# Altium footprint library LED-Optocupler$.PcbLib: 72 footprints (part 1 of 5)
Each footprint in its own frame and in the unit in brackets; x right, y up, seen from the top. Pads: shape width x height; smd on the part's side, far side on the other; paste and mask are expansions set on the pad; w line width, h text height; cw(c..) or ccw(c..) is an arc to the next point about the centre after c.
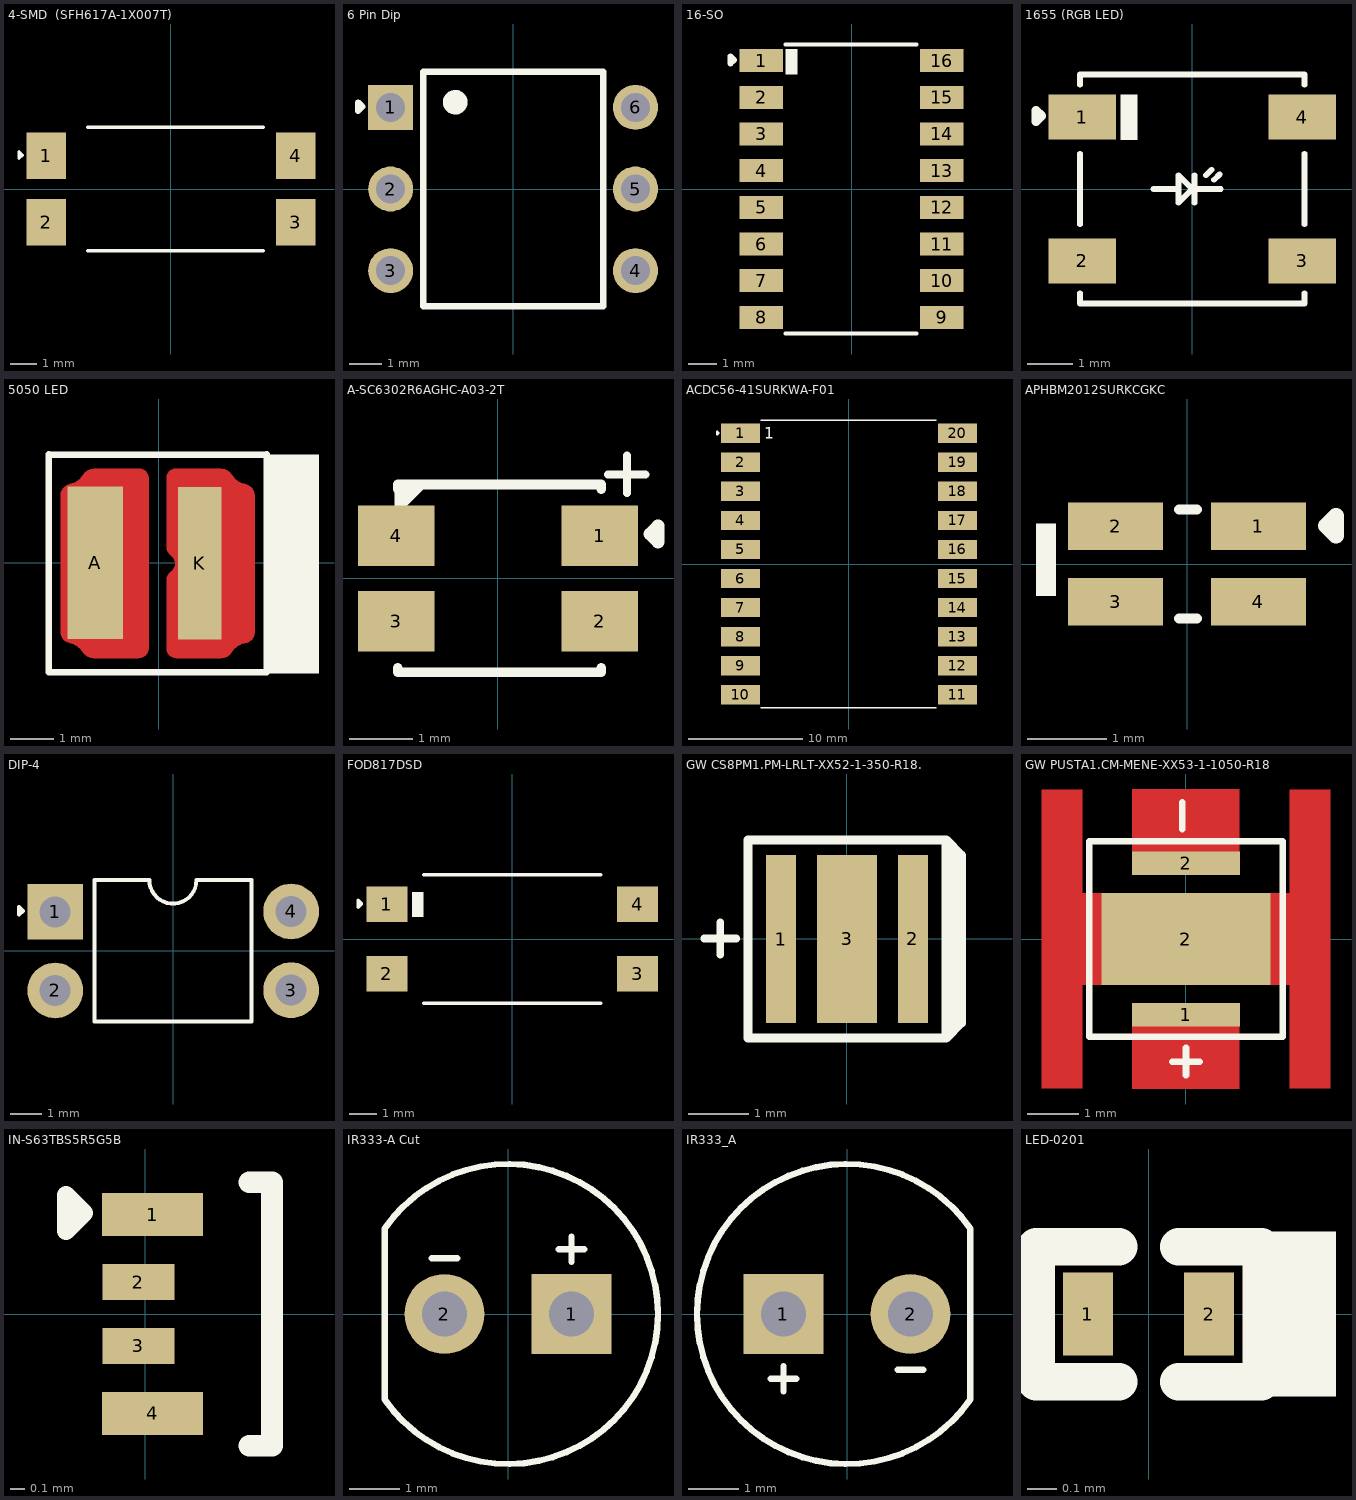
[diagram p0: the footprints below, top view; thin cyan lines are the x and y axes]

## 4-SMD  (SFH617A-1X007T) [mm]
pads (4):
  rect 1.52x1.78 smd mask+0.07: 1(-4.765,1.27) 2(-4.765,-1.27) 3(4.765,-1.27) 4(4.765,1.27)
Top Overlay:
  lines w0.127: -3.175,-2.362 3.531,-2.362 ; -3.175,2.362 3.531,2.362 ; -5.806,1.168 -5.806,1.422 -5.679,1.295 -5.806,1.168
3D body "DIP4-OP7.STEP": height 3.75, standoff 0.06, extent -5.08,-2.29 5.08,2.29

## 6 Pin Dip [mm]
pads (6):
  rect 1.4x1.4 hole 0.9: 1(-3.81,2.54)
  round 1.4 hole 0.9: 2(-3.81,0) 3(-3.81,-2.54) 4(3.81,-2.54) 5(3.81,0) 6(3.81,2.54)
Top Overlay:
  circle w0.2: c-1.8,2.7 r0.283
  lines w0.2: -1.8,2.7 -2,2.6 ; -2,2.6 -1.8,2.9 -1.6,2.7 -1.7,2.5 -2,2.6 ; -4.826,2.438 -4.826,2.692 -4.699,2.565 -4.826,2.438 ; -2.8,-3.65 2.8,-3.65 2.8,3.65 -2.8,3.65 -2.8,-3.65
3D body "User Library-DIP6-White.STEP": height 4.8, standoff -2.5, extent -4.06,-3.56 3.81,3.56

## 16-SO [mm]
pads (16):
  rect 1.5x0.8 smd: 1(-3.125,4.445) 2(-3.125,3.175) 3(-3.125,1.905) 4(-3.125,0.635) 5(-3.125,-0.635) 6(-3.125,-1.905) 7(-3.125,-3.175) 8(-3.125,-4.445) 9(3.125,-4.445) 10(3.125,-3.175) 11(3.125,-1.905) 12(3.125,-0.635) 13(3.125,0.635) 14(3.125,1.905) 15(3.125,3.175) 16(3.125,4.445)
Top Overlay:
  rectangle: -2.286,3.962 -1.88,4.851
  lines w0.127: -2.286,-5.004 2.261,-5.004 ; -2.286,5.004 2.261,5.004
  lines w0.2: -4.191,4.343 -4.191,4.597 -4.064,4.47 -4.191,4.343
3D body "User Library-SOIC-16-1.step": height 1.4, standoff 0, extent -3,-4.95 3,4.95

## 1655 (RGB LED) [mm]
pads (4):
  rect 1.5x1 smd: 1(-2.45,1.6) 2(-2.45,-1.6) 3(2.45,-1.6) 4(2.45,1.6)
Top Overlay:
  rectangle: -1.6,1.092 -1.219,2.108
  lines w0.127: -2.5,-2.322 -2.5,-2.551 2.5,-2.551 2.5,-2.322 ; -2.5,-0.786 -2.5,0.787 ; -2.5,2.322 -2.5,2.551 2.5,2.551 2.5,2.322 ; -0.864,0 -0.305,0 ; 0.051,-0.305 0.051,0.305 ; 0.051,0 0.635,0 ; 0.305,0.305 0.432,0.432 ; 0.483,0.203 0.61,0.33 ; 2.5,-0.786 2.5,0.787 ; -0.305,-0.305 0,0 -0.305,0.305 -0.305,-0.305
  lines w0.2: -3.48,1.499 -3.48,1.753 -3.353,1.626 -3.48,1.499
3D body "1655--3DModel-STEP-56544.STEP": height 1.58, standoff -0.02, extent -2.7,-2.5 2.7,2.5

## 5050 LED [mm]
pads (2):
  rect 1.27x3.5 smd: A(-1.451,0.005)
  rect 1x3.5 smd: K(0.943,-0.005)
Top Layer:
  region: -1.487,-2.185 -0.457,-2.185 -0.397,-2.177 -0.342,-2.154 -0.294,-2.117 -0.257,-2.07 -0.234,-2.014 -0.226,-1.955 -0.226,1.945 -0.235,2.003 -0.259,2.057 -0.296,2.103 -0.343,2.137 -0.398,2.159 -0.457,2.165 -1.487,2.165 -1.558,2.155 -1.625,2.128 -1.683,2.083 -1.727,2.025 -1.781,1.951 -1.781,1.95 -1.782,1.949 -1.783,1.948 -1.784,1.948 -1.852,1.888 -1.852,1.887 -1.853,1.887 -1.854,1.886 -1.855,1.886 -1.934,1.842 -1.936,1.841 -1.937,1.841 -1.938,1.841 -2.027,1.815 -2.086,1.796 -2.141,1.764 -2.186,1.72 -2.219,1.667 -2.24,1.608 -2.247,1.545 -2.247,-1.565 -2.241,-1.629 -2.221,-1.69 -2.187,-1.745 -2.142,-1.79 -2.087,-1.824 -2.027,-1.845 -1.938,-1.87 -1.937,-1.87 -1.936,-1.871 -1.934,-1.871 -1.934,-1.872 -1.855,-1.915 -1.854,-1.915 -1.853,-1.916 -1.852,-1.917 -1.852,-1.918 -1.784,-1.977 -1.783,-1.977 -1.782,-1.979 -1.781,-1.98 -1.727,-2.055 -1.682,-2.11 -1.624,-2.152 -1.557,-2.178
  region: 0.403,-2.185 1.444,-2.185 1.512,-2.177 1.576,-2.151 1.631,-2.109 1.673,-2.055 1.728,-1.98 1.729,-1.979 1.73,-1.977 1.731,-1.977 1.799,-1.918 1.799,-1.917 1.8,-1.916 1.801,-1.915 1.802,-1.915 1.881,-1.872 1.882,-1.871 1.883,-1.871 1.884,-1.87 1.885,-1.87 1.972,-1.845 1.973,-1.845 1.975,-1.844 2.033,-1.83 2.087,-1.802 2.134,-1.762 2.17,-1.712 2.194,-1.655 2.204,-1.595 2.204,1.545 2.196,1.609 2.173,1.669 2.138,1.722 2.091,1.766 2.035,1.797 1.975,1.815 1.974,1.815 1.972,1.816 1.887,1.842 1.887,1.841 1.885,1.842 1.884,1.843 1.807,1.887 1.806,1.887 1.805,1.888 1.804,1.888 1.804,1.889 1.738,1.948 1.738,1.949 1.737,1.95 1.736,1.951 1.684,2.025 1.64,2.083 1.582,2.128 1.515,2.155 1.444,2.165 0.403,2.165 0.347,2.158 0.293,2.136 0.248,2.101 0.213,2.055 0.191,2.002 0.184,1.945 0.184,0.365 0.19,0.31 0.21,0.258 0.241,0.212 0.282,0.177 0.284,0.175 0.285,0.174 0.33,0.134 0.331,0.133 0.332,0.132 0.332,0.131 0.364,0.08 0.365,0.08 0.365,0.078 0.366,0.077 0.382,0.019 0.383,0.019 0.383,0.017 0.383,0.016 0.383,0.015 0.383,-0.045 0.383,-0.047 0.383,-0.048 0.382,-0.049 0.366,-0.106 0.366,-0.107 0.365,-0.108 0.365,-0.109 0.364,-0.11 0.332,-0.161 0.331,-0.162 0.33,-0.163 0.33,-0.164 0.285,-0.203 0.284,-0.205 0.282,-0.206 0.242,-0.239 0.211,-0.282 0.191,-0.332 0.184,-0.385 0.184,-1.965 0.191,-2.022 0.213,-2.075 0.248,-2.12 0.293,-2.155 0.347,-2.177
Top Overlay:
  rectangle: 2.483,-2.54 3.683,2.494
  lines w0.15: -2.517,2.494 -2.517,-2.506 2.483,-2.506 2.483,2.494 ; -2.509,2.486 2.475,2.486

## A-SC6302R6AGHC-A03-2T [mm]
pads (4):
  rect 1.2x0.95 smd paste+0 mask+0.05: 1(1.6,0.675) 2(1.6,-0.675) 3(-1.6,-0.675) 4(-1.6,0.675)
Top Overlay:
  region: -1.626,0.958 -1.076,1.507 -1.626,1.507
  lines w0.127: 1.731,1.637 2.318,1.637 ; 2.024,1.344 2.024,1.93
  lines w0.152: -1.576,-1.405 -1.576,-1.475 1.624,-1.475 1.624,-1.405 ; -1.576,1.407 -1.576,1.477 1.624,1.477 1.624,1.407
  lines w0.2: 2.387,0.7 2.514,0.573 2.514,0.827 2.387,0.7
3D body "C5355456.step": height 1.85, standoff 0, extent -1.75,-1.4 1.75,1.4

## ACDC56-41SURKWA-F01 [mm]
pads (20):
  rect 3.4x1.7 smd: 1(-9.5,11.43) 2(-9.5,8.89) 3(-9.5,6.35) 4(-9.5,3.81) 5(-9.5,1.27) 6(-9.5,-1.27) 7(-9.5,-3.81) 8(-9.5,-6.35) 9(-9.5,-8.89) 10(-9.5,-11.43) 11(9.5,-11.43) 12(9.5,-8.89) 13(9.5,-6.35) 14(9.5,-3.81) 15(9.5,-1.27) 16(9.5,1.27) 17(9.5,3.81) 18(9.5,6.35) 19(9.5,8.89) 20(9.5,11.43)
Top Overlay:
  lines w0.127: -7.696,-12.598 7.645,-12.598 ; -7.696,12.598 7.645,12.598
  lines w0.2: -11.532,11.328 -11.532,11.582 -11.405,11.455 -11.532,11.328
  text "1" at -7.417,10.973 h1
3D body "ACDX56-41.STEP": height 3.8, standoff 0, extent -9.5,-12.55 9.5,12.55

## APHBM2012SURKCGKC [mm]
pads (4):
  rect 1.2x0.6 smd: 1(0.9,0.475) 2(-0.9,0.475) 3(-0.9,-0.475) 4(0.9,-0.475)
Top Overlay:
  rectangle: -1.905,-0.406 -1.651,0.508
  lines w0.127: -0.102,-0.686 0.127,-0.686 ; -0.102,0.686 0.127,0.686
  lines w0.2: 1.753,0.483 1.88,0.61 1.88,0.356 1.753,0.483
3D body "step_temp.STEP": height 0.45, standoff 0, extent -1,-0.625 1,0.625

## DIP-4 [mm]
pads (4):
  rect 1.8x1.8 hole 1 paste+0 mask+0.051: 1(-3.81,1.265)
  round 1.8 hole 1 copper offset 0,0 paste+0 mask+0.051: 2(-3.81,-1.275) 3(3.81,-1.265) 4(3.81,1.275)
Top Overlay:
  lines w0.127: -4.978,1.168 -4.851,1.295 -4.978,1.422 -4.978,1.168 ; -2.542,-2.281 2.532,-2.281 2.532,2.291 0.754,2.291 cw(c-0.008,2.291) -0.77,2.291 -2.542,2.291 -2.542,-2.281
3D body "C142630.step": height 4.29, standoff -3, extent -3.91,-2.3 3.91,2.3

## FOD817DSD [mm]
pads (4):
  rect 1.5x1.3 smd: 1(-4.6,1.27) 2(-4.6,-1.27) 3(4.6,-1.27) 4(4.6,1.27)
Top Overlay:
  rectangle: -3.683,0.813 -3.251,1.727
  lines w0.127: -3.251,-2.362 0,-2.362 3.251,-2.362 ; -3.251,2.362 0,2.362 3.251,2.362 ; -5.664,1.168 -5.664,1.422 -5.537,1.295 -5.664,1.168
3D body "FOD817DSD.step": height 3.85, standoff 0, extent -5.08,-2.3 5.08,2.3

## GW CS8PM1.PM-LRLT-XX52-1-350-R18. [mm]
pads (3):
  rect 0.5x2.8 smd paste+0 mask+0.05: 1(-1.095,-0.008) 2(1.105,-0.007)
  rect 1x2.8 smd paste+0 mask+0.05: 3(0.005,-0.008)
Top Overlay:
  region: 1.656,-1.658 1.656,1.643 1.91,1.389 1.91,-1.405
  lines w0.127: -2.375,0 -1.841,0 ; -2.108,-0.267 -2.108,0.267
  lines w0.152: 1.656,-1.658 -1.646,-1.658 -1.646,1.644 1.656,1.644 ; 1.656,-1.658 1.656,1.644 ; 1.656,-1.659 1.91,-1.405 1.91,1.389 1.656,1.643
3D body "3D_PCB1_2024-11-08.step": height 2.32, standoff 0, extent -1.527,-1.483 1.483,1.517

## GW PUSTA1.CM-MENE-XX53-1-1050-R18 [mm]
pads (3):
  rect 2.1x0.45 smd: 1(0,-1.475) 2(0,1.475)
  rect 3.3x1.8 smd: 2(0,0)
Top Layer:
  rectangle: -1.05,-2.921 1.041,-1.651
  rectangle: -1.05,1.651 1.041,2.921
  region: 2.057,0.9 1.575,0.9 1.575,-0.9 2.057,-0.9
  region: 2.818,2.91 2.018,2.91 2.018,-2.91 2.818,-2.91
  rectangle: -2.057,-0.9 -1.575,0.9
  rectangle: -2.818,-2.91 -2.018,2.91
Top Overlay:
  lines w0.127: -0.267,-2.388 0.267,-2.388 ; -0.076,2.134 -0.076,2.667 ; 0,-2.654 0,-2.121 ; -1.88,-1.905 -1.88,1.905 1.88,1.905 1.88,-1.905 -1.88,-1.905
3D body: height 2.15, standoff 0, extent -1.85,-1.85 1.85,1.85

## IN-S63TBS5R5G5B [mm]
pads (4):
  rect 0.711x0.305 smd mask+0.07: 1(0.05,0.7) 4(0.05,-0.7)
  rect 0.508x0.254 smd mask+0.07: 2(-0.05,0.225) 3(-0.05,-0.225)
Top Overlay:
  lines w0.127: -0.559,0.584 -0.559,0.838 -0.432,0.711 -0.559,0.584
  lines w0.152: 0.73,-0.927 0.89,-0.927 0.89,0.927 0.73,0.927

## IR333-A Cut [mm]
pads (2):
  rect 1.6x1.6 hole 0.9: 1(1.27,0)
  round 1.6 hole 0.9: 2(-1.27,0)
Top Overlay:
  lines w0.127: -1.524,1.118 -1.016,1.118 ; 1.016,1.295 1.524,1.295 ; 1.27,1.041 1.27,1.549 ; -2.466,-1.709 ccw(c0,0) 3,0 ccw(c0,0) -2.466,1.709 -2.466,-1.709
3D body "LED 5mm, Red, Thru-hole, Right Angle PCB 1.stp": height 7.95, standoff -1.2, extent -2.45,-10.7 2.95,0.25

## IR333_A [mm]
pads (2):
  rect 1.6x1.6 hole 0.9: 1(-1.27,0)
  round 1.6 hole 0.9: 2(1.27,0)
Top Overlay:
  lines w0.127: -1.524,-1.295 -1.016,-1.295 ; -1.27,-1.549 -1.27,-1.041 ; 1.016,-1.118 1.524,-1.118 ; -3,0 cw(c0,0) 2.466,1.709 2.466,-1.709 cw(c0,0) -3,0
3D body "LED 5mm, Red, Thru-hole, Right Angle PCB 2.stp": height 7.95, standoff -1.2, extent -2.954,-10.721 2.446,0.229

## LED-0201 [mm]
pads (2):
  rect 0.17x0.28 smd mask+0.05: 1(-0.205,0) 2(0.205,0)
Top Overlay:
  rectangle: 0.381,-0.279 0.635,0.279
  lines w0.127: -0.102,-0.229 -0.381,-0.229 -0.381,0.229 -0.102,0.229 ; 0.102,-0.229 0.381,-0.229 0.381,0.229 0.102,0.229